# Altium integrated library CRCW060310M0FHEAP.IntLib: 1 symbol
Pins are listed as number, name and electrical type; pins without a type are passive.

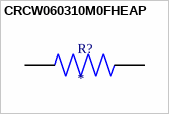
[diagram p0: symbol CRCW060310M0FHEAP]

## CRCW060310M0FHEAP
designator R?
MP: CRCW060310M0FHEAP; Package: None; Price: None; Value: *; Availability: Unavailable
footprint RESC1508X50N
pins: 1, 2